# Altium schematic symbol library Kamoer_NKP.SchLib: 1 symbol
Pins are listed as number, name and electrical type; pins without a type are passive.

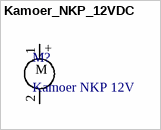
[diagram p0: symbol Kamoer_NKP_12VDC]

## Kamoer_NKP_12VDC
designator M?, comment Kamoer NKP 12V
Kamoer NKP peristaltic pump, 12 V DC brushed motor, 2-wire; Manufacturer Part Number: NKP-DC-S10B; Rated Voltage: 12V DC; Rated Current: 0.25A (Kamoer catalogue, NKP DC 12 V); Pump Tube: 3mm ID x 5mm OD silicone; Pin 1: + (red-marked motor tab); swap leads to reverse flow; Mounting Hardware: 2x M3 hex standoff F-F, length 40mm minus wall thickness; 2x M3 screw, plate(~3.5)+wall+4.5mm; 2x M3x6 screw through PCB; Exclude From BOM Upload: Yes - hand-assembled, not an LCSC part; Component Type: Peristaltic pump, brushed DC motor; Mounting: Default: motor tabs soldered in PCB slots; plate on OUTSIDE of enclosure wall, M3 screws through plate + wall into standoffs holding the PCB (plan 2026-11-11); Manufacturer: Kamoer; Supplier: Amazon
footprint KAMOER_NKP_VERTICAL_TABS (Stands on motor end, tabs soldered into slots, M3 standoffs to plate)
footprint KAMOER_NKP_STRAIGHT_PANEL (Straight plate, PCB as panel, motor through dia 31 cutout, wired leads)
footprint KAMOER_NKP_LPLATE_FLAT (L plate, foot screwed flat to PCB, motor parallel to board)
pins: 1 +, 2 -
text: M